# Altium schematic symbol library LMR51610XFDBVR.SchLib: 1 symbol
Pins are listed as number, name and electrical type; pins without a type are passive.

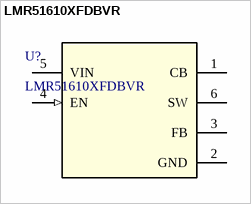
[diagram p0: symbol LMR51610XFDBVR]

## LMR51610XFDBVR
designator U?
SIMPLE SWITCHERÂ® power converter with 4.5V-to-65V 1A synchronous buck and 25ÂµA quiescent current 6-SOT-23 -40 to 150; Manufacturer_Name: Texas Instruments; TYPE: TYPE; RefDes: RefDes; Copyright: Copyright (C) 2026 Ultra Librarian. All rights reserved.; Manufacturer_Part_Number: LMR51610XFDBVR
pins: 1 CB, 2 GND (power), 3 FB, 4 EN (in), 5 VIN (power), 6 SW